# Altium schematic symbol library Connector.SchLib: 208 symbols (part 3 of 4)
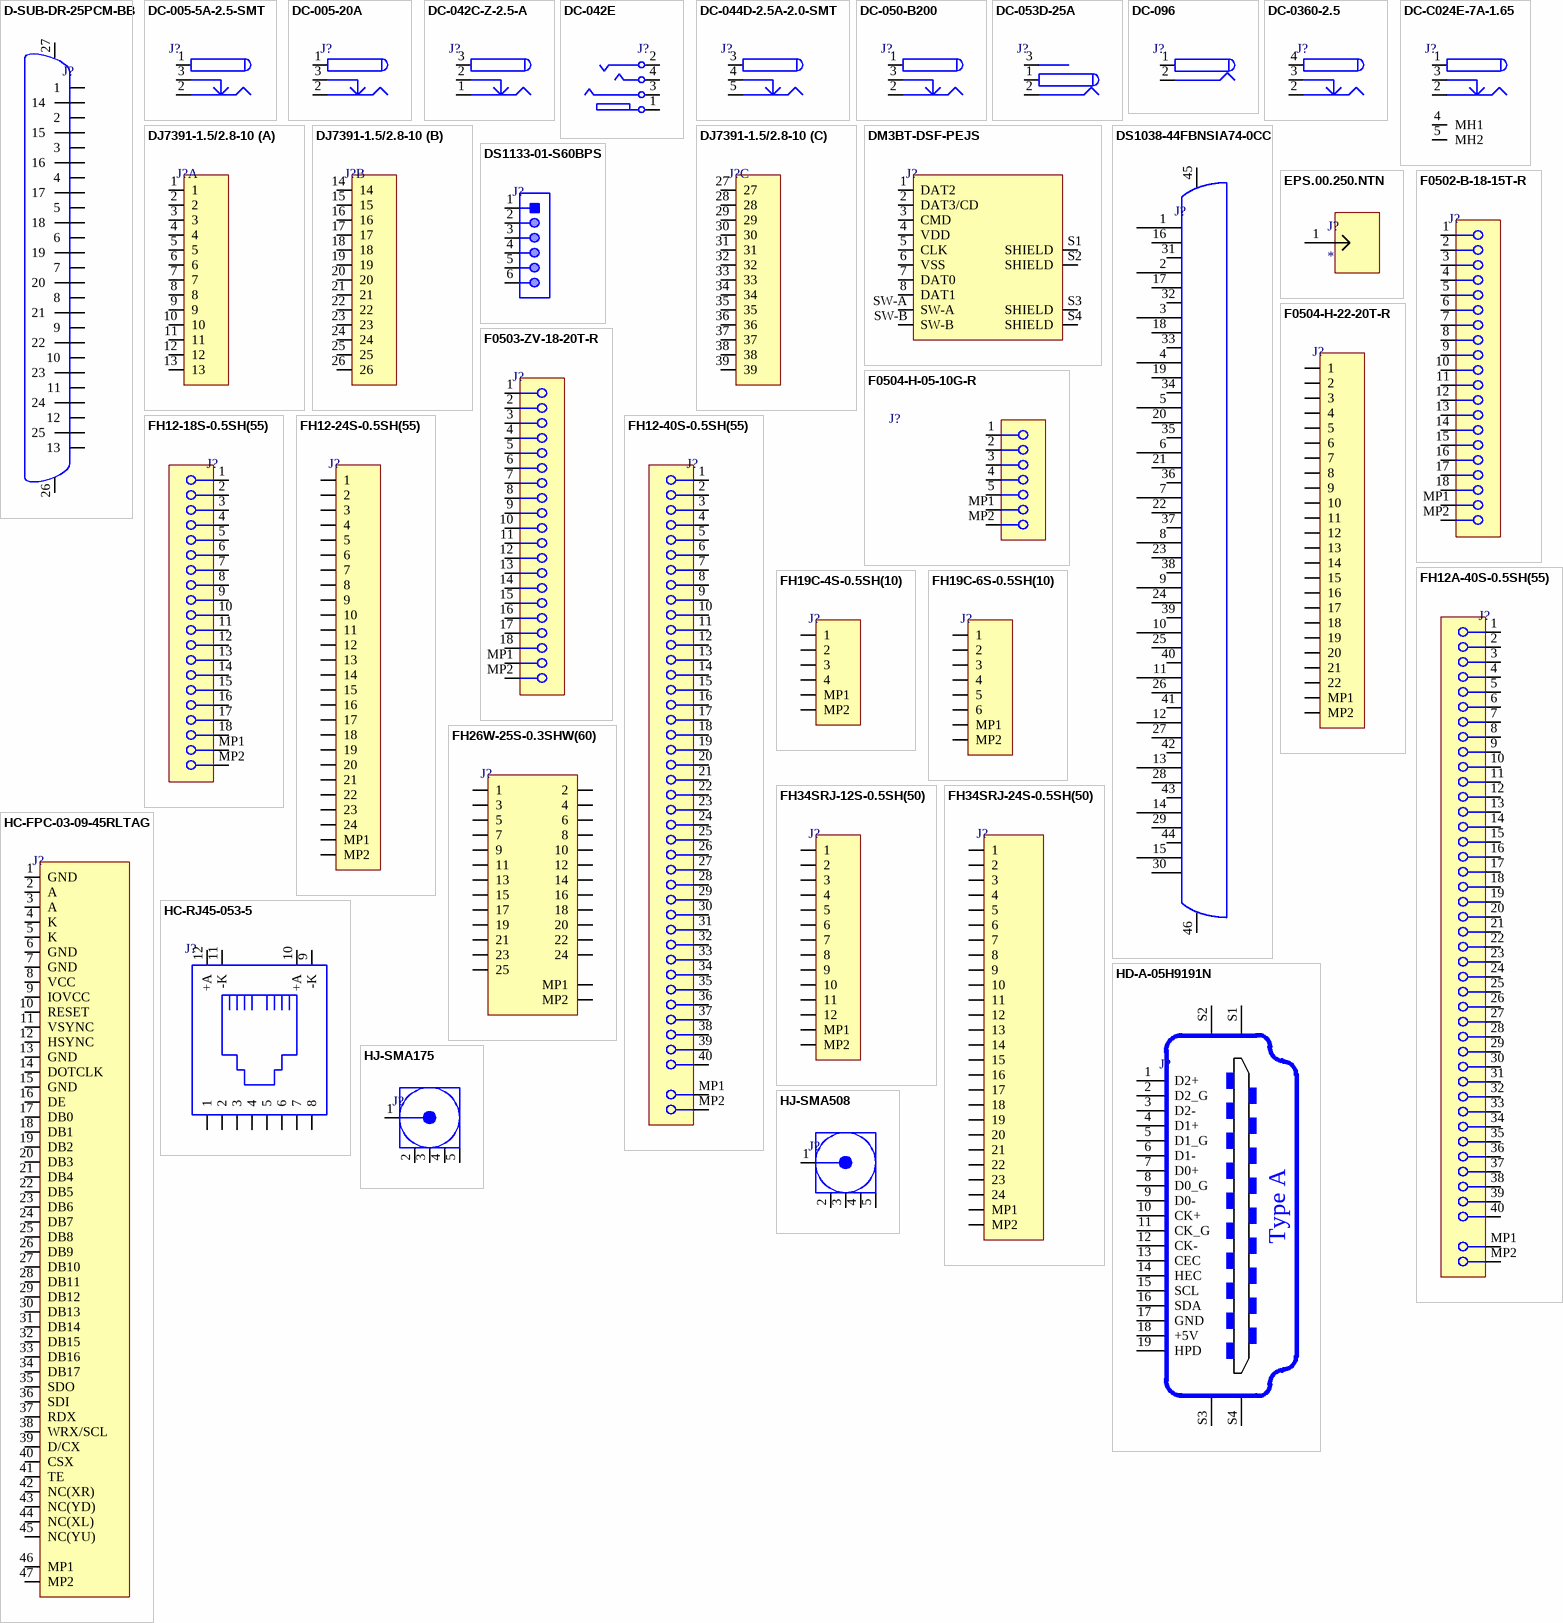
[diagram p10: symbols D-SUB-DR-25PCM-BB to HJ-SMA508]

## FH12A-40S-0.5SH(55)
designator J?
CONN FFC TOP 40POS 0.50MM R/A; Manufacturer: Hirose; Manufacturer Part Number: FH12A-40S-0.5SH(55); Connector Type: CARD EDGE CONNECTOR; Option: General Purpose; Contact Pattern: RECTANGULAR; Contact Style: BELLOWED TYPE; Filter Feature: No; Number Of PCB Rows: 1; Number of Contacts: 40; Board Mounting Option: SOLDER HOLDING POSTS; Contact Resistance: 50mR; Dielectric Withstanding Voltage (AC): 150V; Durability: 20Cycles; Insulation Resistance: 500MR; Rated Current (Signal): 500mA; Additional Feature: ROHS COMPLIANT; Body Breadth: 0.079inch; Body Length: 0.965inch; Mating Contact Pitch: 0.02inch; Mounting Option 1: LOCKING; Body Depth: 0.276inch; Reference Standard: UL; Reliability: COMMERCIAL; Item Type: FFC Connector; Supplier 1: Rs; RoHS: Yes; Category: FFC / FPC; Stock 1: 1020; Pricing 1: 200=1.21900, 750=1.09200, 3000=0.99700, 6000=0.89700 (GBP); Mounting Technology: Board; Contact Material: Bronze; Contact Finish - Mating: GOLD (8); Contact Finish - Termination: Gold (Au) - with Nickel (Ni) barrier; Insulation Color: Beige; Insulation Material: Polyamide; Min Operating Temperature: -40°C; Max Operating Temperature: 85°C; JESD-609 Code: e4; Contact Gender: Female; Mixed Contacts: No; Mounting Style: RIGHT ANGLE; Number of Rows Loaded: 1; PCB Contact Pattern: RECTANGULAR; Termination: SMD/SMT; Terminal Pitch: 0.5mm; Flammability Rating: UL94 V-0; RoHS Compliant: Yes; DIN Conformance: No; IEC Conformance: No; MIL Conformance: No; Reach SVHC Compliant: Yes; ComponentLink1URL: https://datasheet.ciiva.com:443/pdfs/VipMasterIC/IC/HIRO/HIRO-S-A0001800623/HIRO-S-A0003173477-1.pdf?src-supplier=IHS+Markit; ComponentLink1Description: https://datasheet.ciiva.com:443/pdfs/VipMasterIC/IC/HIRO/HIRO-S-A0001800623/HIRO-S-A0003173477-1.pdf?src-supplier=IHS+Markit; ComponentLink2URL: https://datasheet.ciiva.com/14667/0900766b80806912-14667338.pdf?src-supplier=Rs; ComponentLink2Description: https://datasheet.ciiva.com/14667/0900766b80806912-14667338.pdf?src-supplier=Rs; ComponentLink3URL: https://datasheet.ciiva.com/15176/getdatasheetpartid-432540-15176844.pdf?src-supplier=Verical; ComponentLink3Description: https://datasheet.ciiva.com/15176/getdatasheetpartid-432540-15176844.pdf?src-supplier=Verical; ComponentLink4URL: https://datasheet.ciiva.com/11745/0900766b80d985fc-11745193.pdf?src-supplier=Rs; ComponentLink4Description: https://datasheet.ciiva.com/11745/0900766b80d985fc-11745193.pdf?src-supplier=Rs; Supplier Part Number 1: 6882839P; LCSC Part Number: C506795
footprint FH12A-40S-0.5SH(55)
pins: 1, 2, 3, 4, 5, 6, 7, 8, 9, 10, 11, 12, 13, 14, 15, 16, 17, 18, 19, 20, 21, 22, 23, 24, 25, 26, 27, 28, 29, 30, 31, 32, 33, 34, 35, 36, 37, 38, 39, 40, MP1, MP2

## FH19C-4S-0.5SH(10)
designator J?
CONN FFC BOTTOM 4POS 0.5MM R/A; Manufacturer: Hirose; Manufacturer Part Number: FH19C-4S-0.5SH(10); Actuator Material: Polymer,Polyphenylene,Liquid Crystal Polymer; Voltage Rating: 50V; Current Rating: 500mA; Number of Positions: 4; Insulation Resistance: 500MR; Wire/Cable Type: Flat Flex; Pitch: 0.02inch; Item Type: FPC Connector; Supplier 1: Digi-Key; RoHS: Yes; Category: FFC / FPC; Stock 1: 7956; Pricing 1: 1=1.08, 10=0.916, 25=0.878, 50=0.8596, 100=0.8221, 250=0.7474, 500=0.67266, 1000=0.59792, 2500=0.54186 (USD); Mounting Technology: Surface Mount; Contact Material: Bronze; Contact Plating: Gold; Housing Material: Polymer; Min Operating Temperature: -55°C; Max Operating Temperature: 85°C; Packaging: Tape and Reel; Package Quantity: 5000; Termination: Solder; Series: FH19C; Flammability Rating: UL94 V-0; RoHS Compliant: Yes; ComponentLink1URL: https://datasheet.ciiva.com/18563/ed-fh19cfh19sc-20140305-18563548.pdf?src-supplier=Digi-Key; ComponentLink1Description: https://datasheet.ciiva.com/18563/ed-fh19cfh19sc-20140305-18563548.pdf?src-supplier=Digi-Key; Supplier Part Number 1: H125822CT-ND; LCSC Part Number: C424650
footprint FH19C-4S-0.5SH(10)
pins: 1, 2, 3, 4, MP1, MP2

## FH19C-6S-0.5SH(10)
designator J?
CONN FFC BOTTOM 6POS 0.50MM R/A; Manufacturer: Hirose; Manufacturer Part Number: FH19C-6S-0.5SH(10); Item Type: FFC Connector; Supplier 1: Digi-Key; RoHS: Yes; Category: FFC / FPC; Stock 1: 4697; Pricing 1: 1=1.10000, 10=0.96900, 25=0.91200, 50=0.87400, 100=0.83600, 250=0.76000, 500=0.68400, 1000=0.60800, 2500=0.55100 (USD); ComponentLink1URL: https://datasheet.ciiva.com/18563/ed-fh19cfh19sc-20140305-18563530.pdf?src-supplier=Digi-Key; ComponentLink1Description: https://datasheet.ciiva.com/18563/ed-fh19cfh19sc-20140305-18563530.pdf?src-supplier=Digi-Key; Supplier Part Number 1: H125824CT-ND; LCSC Part number: C424651
footprint FH19C-6S-0.5SH(10)_
pins: 1, 2, 3, 4, 5, 6, MP1, MP2

## FH26W-25S-0.3SHW(60)
designator J?
CONN FPC BOTTOM 25POS 0.3MM R/A; Manufacturer: Hirose; Manufacturer Part Number: FH26W-25S-0.3SHW(60); Item Type: FPC Connector; Supplier 1: Future Electronics; RoHS: Yes; Category: FFC / FPC; Stock 1: 5000; Pricing 1: 5000=0.85500 (USD); ComponentLink1URL: https://www.hirose.com/product/en/download_file/key_name/FH26/category/Catalog/doc_file_id/49355/?file_category_id=4&item_id=298&is_series=1&src-supplier=Digi-Key; ComponentLink1Description: https://www.hirose.com/product/en/download_file/key_name/FH26/category/Catalog/doc_file_id/49355/?file_category_id=4&item_id=298&is_series=1&src-supplier=Digi-Key; ComponentLink2URL: https://www.hirose.com/product/download/?distributor=digikey&amp;type=2d&amp;lang=en&amp;num=FH26W-13S-0.3SHW(60)&src-supplier=Digi-Key; ComponentLink2Description: https://www.hirose.com/product/download/?distributor=digikey&amp;type=2d&amp;lang=en&amp;num=FH26W-13S-0.3SHW(60)&src-supplier=Digi-Key; ComponentLink3URL: https://www.hirose.com/product/download/?distributor=digikey&amp;type=specSheet&amp;lang=en&amp;num=FH26W-25S-0.3SHW(60)&src-supplier=Digi-Key; ComponentLink3Description: https://www.hirose.com/product/download/?distributor=digikey&amp;type=specSheet&amp;lang=en&amp;num=FH26W-25S-0.3SHW(60)&src-supplier=Digi-Key; Supplier Part Number 1: 6089120; LCSC Part Number: C2904698
footprint FH26W-25S-0.3SHW(60)
pins: 1, 2, 3, 4, 5, 6, 7, 8, 9, 10, 11, 12, 13, 14, 15, 16, 17, 18, 19, 20, 21, 22, 23, 24, 25, MP1, MP2

## FH34SRJ-12S-0.5SH(50)
designator J?
CONN FPC/FFC 12POS .5MM; Manufacturer: Hirose; Manufacturer Part Number: FH34SRJ-12S-0.5SH(50); Item Type: FFC Connector; Supplier 1: Digi-Key; RoHS: Yes; Category: FFC / FPC; Pricing 1: 5000=0.47775 (USD); ComponentLink1URL: https://www.hirose.com/product/en/download_file/key_name/FH34SRJ/category/Catalog/doc_file_id/31646/?file_category_id=4&item_id=27&is_series=1&src-supplier=Digi-Key; ComponentLink1Description: https://www.hirose.com/product/en/download_file/key_name/FH34SRJ/category/Catalog/doc_file_id/31646/?file_category_id=4&item_id=27&is_series=1&src-supplier=Digi-Key; Supplier Part Number 1: FH34SRJ-12S-0.5SH(50)-ND; LCSC Part Number: C424659
footprint FH34SRJ-12S-0.5SH(50)_
pins: 1, 2, 3, 4, 5, 6, 7, 8, 9, 10, 11, 12, MP1, MP2

## FH34SRJ-24S-0.5SH(50)
designator J?
CONN FPC/FFC 24POS .5MM; Manufacturer: Hirose; Manufacturer Part Number: FH34SRJ-24S-0.5SH(50); Supplier 1: Digi-Key; RoHS: Yes; Category: FFC / FPC; Stock 1: 5000; Pricing 1: 5000=0.53562 (USD); ComponentLink1URL: https://www.hirose.com/product/download/?distributor=digikey&amp;type=specSheet&amp;lang=en&amp;num=FH34SRJ-24S-0.5SH(50)&src-supplier=Digi-Key; ComponentLink1Description: https://www.hirose.com/product/download/?distributor=digikey&amp;type=specSheet&amp;lang=en&amp;num=FH34SRJ-24S-0.5SH(50)&src-supplier=Digi-Key; Supplier Part Number 1: FH34SRJ-24S-0.5SH(50)-ND; LCSC Part Number: C324726
footprint FH34SRJ-24S-0.5SH(50)
pins: 1, 2, 3, 4, 5, 6, 7, 8, 9, 10, 11, 12, 13, 14, 15, 16, 17, 18, 19, 20, 21, 22, 23, 24, MP1, MP2

## HC-FPC-03-09-45RLTAG
designator J?
-55℃~+85℃ Clamshell 45P Bottom Contact Surface Mount，Right Angle 0.3mm SMD,P=0.3mm,Surface Mount，Right Angle FFC/FPC Connectors ROHS; Manufacturer: HCTL; Manufacturer Part Number: HC-FPC-03-09-45RLTAG; Package: SMD,P=0.3mm,Surface Mount，Right Angle; LCSC Part Number: C5213725; Item Type: FFC/FPC Connector; ComponentLink1Description: LCSC; ComponentLink1URL: https://www.lcsc.com/product-detail/FFC-FPC-Connectors_HCTL-HC-FPC-03-09-45RLTAG_C5213725.html
footprint HC-FPC-03-09-45RLTAG
pins: 1 GND, 2 A, 3 A, 4 K, 5 K, 6 GND, 7 GND, 8 VCC, 9 IOVCC, 10 RESET, 11 VSYNC, 12 HSYNC, 13 GND, 14 DOTCLK, 15 GND, 16 DE, 17 DB0, 18 DB1, 19 DB2, 20 DB3, 21 DB4, 22 DB5, 23 DB6, 24 DB7, 25 DB8, 26 DB9, 27 DB10, 28 DB11, 29 DB12, 30 DB13, 31 DB14, 32 DB15, 33 DB16, 34 DB17, 35 SDO, 36 SDI, 37 RDX, 38 WRX/SCL, 39 D/CX, 40 CSX, 41 TE, 42 NC(XR), 43 NC(YD), 44 NC(XL), 45 NC(YU), 46 MP1, 47 MP2

## HC-RJ45-053-5
designator J?
Plugin Ethernet Connectors/Modular Connectors (RJ45 RJ11) ROHS; Manufacturer Part Number: HC-RJ45-053-5; Manufacturer: HCTL; LCSC Part Number: C3010566; Item Type: Connectors (RJ45 RJ11); ComponentLink1Description: LCSC; ComponentLink1URL: https://www.lcsc.com/product-detail/Ethernet-Connectors-Modular-Connectors-span-style-background-color-ff0-RJ45-span-RJ11_HCTL-HC-RJ45-053-5_C3010566.html
footprint HC-RJ45-053-5
pins: 1, 2, 3, 4, 5, 6, 7, 8, 9 -K, 10 +A, 11 -K, 12 +A

## HD-A-05H9191N
designator J?
19P Female HDMI Surface Mount，Right Angle 1 500mA -45℃~+85℃ SMD D-Sub/DVI/HDMI Connectors ROHS; Manufacturer: HanElectricity; Manufacturer Part Number: HD-A-05H9191N; Package: SMD; LCSC Part Number: C18213861; Item Type: HDMI; ComponentLink1Description: LCSC; ComponentLink1URL: https://www.lcsc.com/product-detail/D-Sub-DVI-HDMI-Connectors_HanElectricity-HD-A-05H9191N_C18213861.html
footprint HD-A-05H9191N
pins: 1 D2+, 2 D2_G, 3 D2-, 4 D1+, 5 D1_G, 6 D1-, 7 D0+, 8 D0_G, 9 D0-, 10 CK+, 11 CK_G, 12 CK-, 13 CEC, 14 HEC, 15 SCL, 16 SDA, 17 GND, 18 +5V, 19 HPD, S1 Shield "Shell", S2 Shield "Shell", S3 Shield "Shell", S4 Shield "Shell"
text: Type A

## HJ-SMA175
designator J?
1 Inner bore SMA Board Edge Bend 11mm 5.35mm Plugin RF Connectors / Coaxial Connectors ROHS; Manufacturer: HJ Tech; Manufacturer Part Number: HJ-SMA175; Item Type: SMA Connector; Package: Plugin; LCSC Part Number: C1509213; ComponentLink1Description: LCSC; ComponentLink1URL: https://www.lcsc.com/product-detail/RF-Connectors-Coaxial-Connectors_HJ-Tech-HJ-SMA175_C1509213.html
footprint HJ-SMA175
pins: 1 Signal "Signal Pin", 2 GND, 3 GND, 4 GND, 5 GND

## HJ-SMA508
designator J?
1 Inner bore SMA Board Edge Bend -55℃~+155℃ 50Ω Plugin RF Connectors / Coaxial Connectors ROHS; Manufacturer: HJ Tech; Manufacturer Part Number: HJ-SMA508; Footprint: Custom; ComponentLink1Description: LCSC; ComponentLink1URL: https://lcsc.com/product-detail/RF-Connectors-Coaxial-Connectors_HJ-Tech-HJ-SMA508_C1509209.html; LCSC Part Number: C1509209; Item Type: SMA
footprint HJ-SMA508_
pins: 1 Signal "Signal Pin", 2 GND, 3 GND, 4 GND, 5 GND

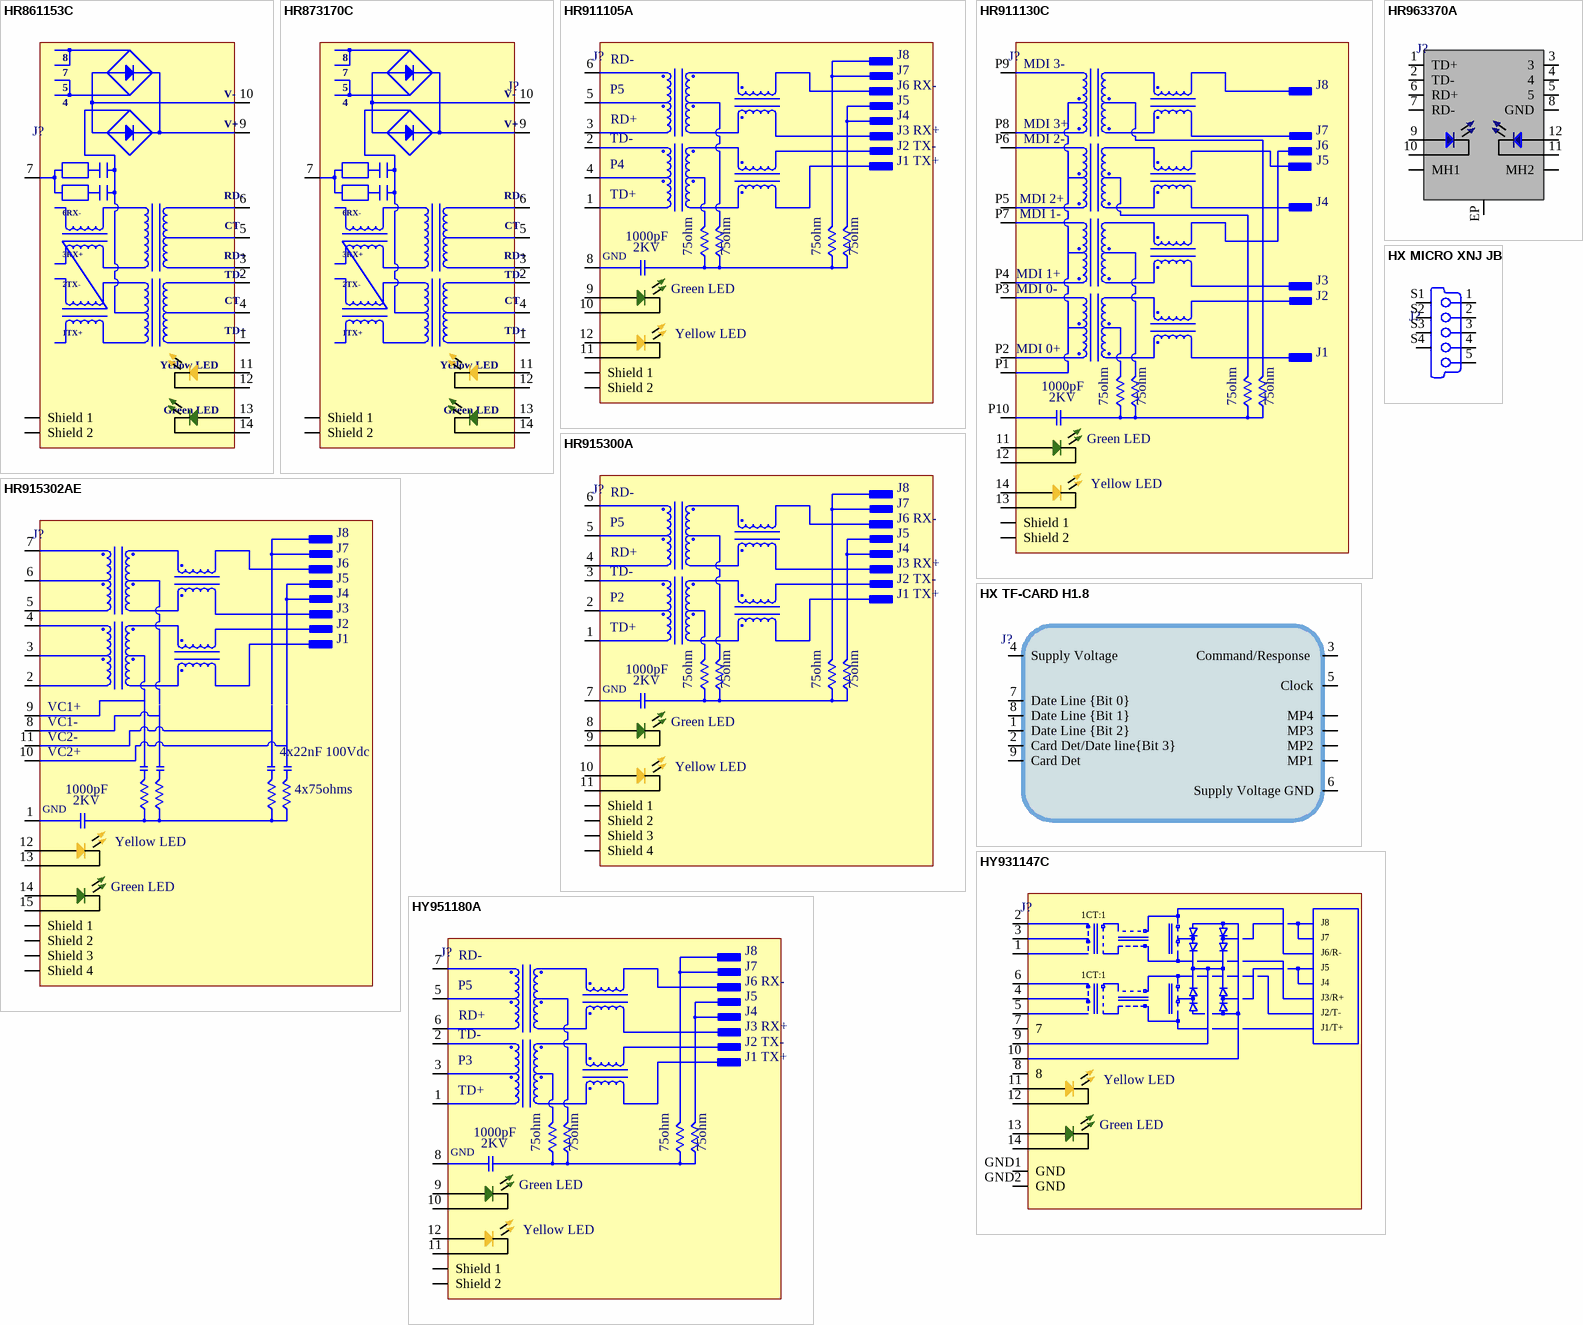
[diagram p5: symbols HR861153C to HY951180A]

## HR861153C
designator J?
Single Port RJ45 Connector with Integrated Magnetics and LED for 10/100Base-TX PoE application; Manufacturer: Hanrun; Manufacturer Part Number: HR861153C; Item Type: Ethernet Connector; Package: Custom; LCSC Part Number: *
footprint HR861153C
pins: 1 TD+, 2 TD-, 3 RD+, 4 CT, 5 CT, 6 RD-, 7 GND, 9 V+, 10 V-, 11 ANODE , 12 CATHODE, 13 ANODE , 14 CATHODE, Shield 1, Shield 2
text: 8; 6RX-; 3RX+; 2TX-; 1TX+; Yellow LED; Green LED

## HR873170C
designator J?
1x1 Port Tab-UP RJ45 Connector with Integrated Magnetics and LED for 10/100Base-T PoE application; Manufacturer: Hanrun; Manufacturer Part Number: HR873170C; Item Type: Ethernet Connector; Package: Custom; LCSC Part Number: *
footprint HR873170C
pins: 1 TD+, 2 TD-, 3 RD+, 4 CT, 5 CT, 6 RD-, 7 GND, 9 V+, 10 V-, 11 ANODE , 12 CATHODE, 13 ANODE , 14 CATHODE, Shield 1, Shield 2
text: 8; 6RX-; 3RX+; 2TX-; 1TX+; Yellow LED; Green LED

## HR911105A
designator J?
RJ45 RJReceptacle 1 WithLED Plugin Ethernet Connectors/Modular Connectors (RJ45 RJ11) ROHS; Manufacturer: HANRUN; Manufacturer Part Number: HR911105A; Item Type: RJ45 Connector; Package: Plugin; LCSC Part Number: C12074; ComponentLink1Description: LCSC; ComponentLink1URL: https://www.lcsc.com/product-detail/Ethernet-Connectors-Modular-Connectors-RJ45-RJ11_HANRUN-Zhongshan-HanRun-Elec-HR911105A_C12074.html
footprint HR911105A
pins: 1 TD+, 2 TD-, 3 RD+, 4 P4, 5 P5, 6 RD-, 8 GND (power), 9 ANODE , 10 CATHODE, 11 CATHODE, 12 ANODE , Shield 1, Shield 2
text: J8; J7; J6 RX-; J5; J4; J3 RX+; J2 TX-; J1 TX+; 1000pF; 2KV; 75ohm; Green LED; Yellow LED

## HR911130C
designator J?
RJ45 RJReceptacle 1 Internal oscillator included Shrouded WithLED Plugin Ethernet Connectors/Modular Connectors (RJ45 RJ11) ROHS; Manufacturer: HANRUN; Manufacturer Part Number: HR911130C; LCSC Part Number: C50933; Item Type: Ethernet Connector; ComponentLink1Description: LCSC; ComponentLink1URL: https://www.lcsc.com/product-detail/Ethernet-Connectors-Modular-Connectors-RJ45-RJ11_HANRUN-Zhongshan-HanRun-Elec-HR911130C_C50933.html
footprint HR911130C
pins: 11, 12, 13, 14, P1, P2, P3 P4, P4, P5, P6, P7, P8, P9, P10 (power), SH1 Shield 1, SH2 Shield 2
text: MDI 3-; J8; MDI 3+; J7; MDI 2-; J6; J5; MDI 2+; J4; MDI 1-; MDI 1+; J3; MDI 0-; J2; MDI 0+; J1; 1000pF; 2KV; 75ohm; Green LED; Yellow LED

## HR915300A
designator J?
Plugin Ethernet Connectors/Modular Connectors (RJ45 RJ11) ROHS; Manufacturer: HANRUN; Manufacturer Part Number: HR915300A; Item Type: Connectors (RJ45 RJ11); Package: Cuatom
footprint HR915300A
pins: 1 TD+, 2 P4, 3 TD-, 4 RD+, 5 P5, 6 RD-, 7 GND (power), 8 ANODE , 9 CATHODE, 10 ANODE , 11 CATHODE, SH1 Shield 1, SH2 Shield 2, SH3 Shield 3, SH4 Shield 4
text: J8; J7; J6 RX-; J5; J4; J3 RX+; J2 TX-; P2; J1 TX+; 1000pF; 2KV; 75ohm; Green LED; Yellow LED

## HR915302AE
designator J?
Low Profile 1x1 Port Tab-UP RJ45 Connector with Magnetics Module and LED For 10/100 Base T PoE Application; Manufacturer: Hanrun; Manufacturer Part Number: HR915302AE; Item Type: Connector RJ45; Package: Custom
footprint HR915302AE
pins: 1 P1 (power), 2 P2, 3 P3, 4 P4, 5 P5, 6 P6, 7 P7, 8 VC1-, 9 VC1+, 10 VC2+, 11 VC2-, 12 ANODE , 13 CATHODE, 14 ANODE , 15 CATHODE, SH1 Shield 1, SH2 Shield 2, SH3 Shield 3, SH4 Shield 4
text: J8; J7; J6; J5; J4; J3; J2; J1; 4x22nF 100Vdc; 1000pF; 4x75ohms; 2KV; GND; Yellow LED; Green LED

## HR963370A
designator J?
1x1 Port Tab upright Surface Mount RJ45 Connector with Integrated Magnetics and LED; Manufacturer: Hanrun; Manufacturer Part Number: HR963370A; Item Type: Ethernet Connector; Package: Custom
footprint HR963370A
pins: 1 TD+, 2 TD-, 3, 4, 5, 6 RD+, 7 RD-, 8 GND, 9 ANODE , 10 CATHODE, 11 CATHODE, 12 ANODE , EP, MH1, MH2

## HX MICRO XNJ JB
designator J?
Female Micro-B SMD USB Connectors ROHS; Manufacturer: HANXIA; Manufacturer Part Number: HX MICRO XNJ JB; Item Type: Micro-B Connector; Package: Custom; LCSC Part Number: C5160305; ComponentLink1Description: LCSC; ComponentLink1URL: https://www.lcsc.com/product-detail/USB-Connectors_hanxia-HX-MICRO-XNJ-JB_C5160305.html
footprint HX MICRO XNJ JB
pins: 1 V BUS (5V) "USB Vcc [Red]", 2 D- "USB Data - [White]", 3 D+ "USB Data + [Green]", 4 ID "Not Connected (or joined to pin 5 via resistor)", 5 GND "Ground [Black]", S1 Shield "Shell", S2 Shield "Shell", S3 Shield "Shell", S4 Shield "Shell"

## HX TF-CARD H1.8
designator J?
-40℃~+70℃ 1.8mm Gold Card Slot MicroSD card (TF card) Brass Alloy Self-bouncing SMD SD Card / Memory Card Connector ROHS; Manufacturer: hanxia; Manufacturer Part Number: HX TF-CARD H1.8; Card Connection Mode: Pluggable; Item Type: MicroSD; ComponentLink1Description: LCSC; ComponentLink1URL: https://www.lcsc.com/product-detail/SD-Card-Memory-Card-Connector_hanxia-HX-TF-CARD-H1-8_C19189036.html; LCSC Part Number: C19189036
footprint HX TF-CARD H1.8
pins: 1 Date Line {Bit 2}, 2 Card Det/Date line{Bit 3}, 3 Command/Response , 4 Supply Voltage (power), 5 Clock, 6 Supply Voltage GND (power), 7 Date Line {Bit 0}, 8 Date Line {Bit 1}, 9 Card Det, MP1, MP2, MP3, MP4

## HY931147C
designator J?
RJ45Receptacle 1 WithLED Plugin Ethernet Connectors / Modular Connectors (RJ45 RJ11) ROHS; Manufacturer: HANRUN; Manufacturer Part Number: HY931147C; Item Type: RJ45 Connector; Package: Plugin; LCSC Part Number: C91754; ComponentLink1Description: LCSC; ComponentLink1URL: https://www.lcsc.com/product-detail/Ethernet-Connectors-Modular-Connectors-RJ45-RJ11_HANRUN-Zhongshan-HanRun-Elec-HY931147C_C91754.html
footprint HY931147C
pins: 1, 2, 3, 4, 5, 6, 7, 8, 9, 10, 11, 12, 13, 14, GND1 GND, GND2 GND
text: 1CT:1; J8; J7; J6/R-; J5; J4; J3/R+; J2/T-; J1/T+; Yellow LED; Green LED

## HY951180A
designator J?
Through Hole Ethernet Connectors/Modular Connectors (RJ45 RJ11) ROHS; Manufacturer: HANRUN; Manufacturer Part Number: HY951180A; Item Type: RJ45 Connector; Package: Custom; LCSC Part Number: C34677; ComponentLink1Description: LCSC; ComponentLink1URL: https://lcsc.com/product-detail/Ethernet-Connectors-Modular-Connectors-RJ45-RJ11_HANRUN-Zhongshan-HanRun-Elec-HY951180A_C34677.html
footprint HY951180A.
pins: 1 TD+, 2 TD-, 3 P3, 5 P5, 6 RD+, 7 RD-, 8 GND (power), 9 ANODE , 10 CATHODE, 11 CATHODE, 12 ANODE , Shield 1, Shield 2
text: J8; J7; J6 RX-; J5; J4; J3 RX+; J2 TX-; J1 TX+; 1000pF; 2KV; 75ohm; Green LED; Yellow LED

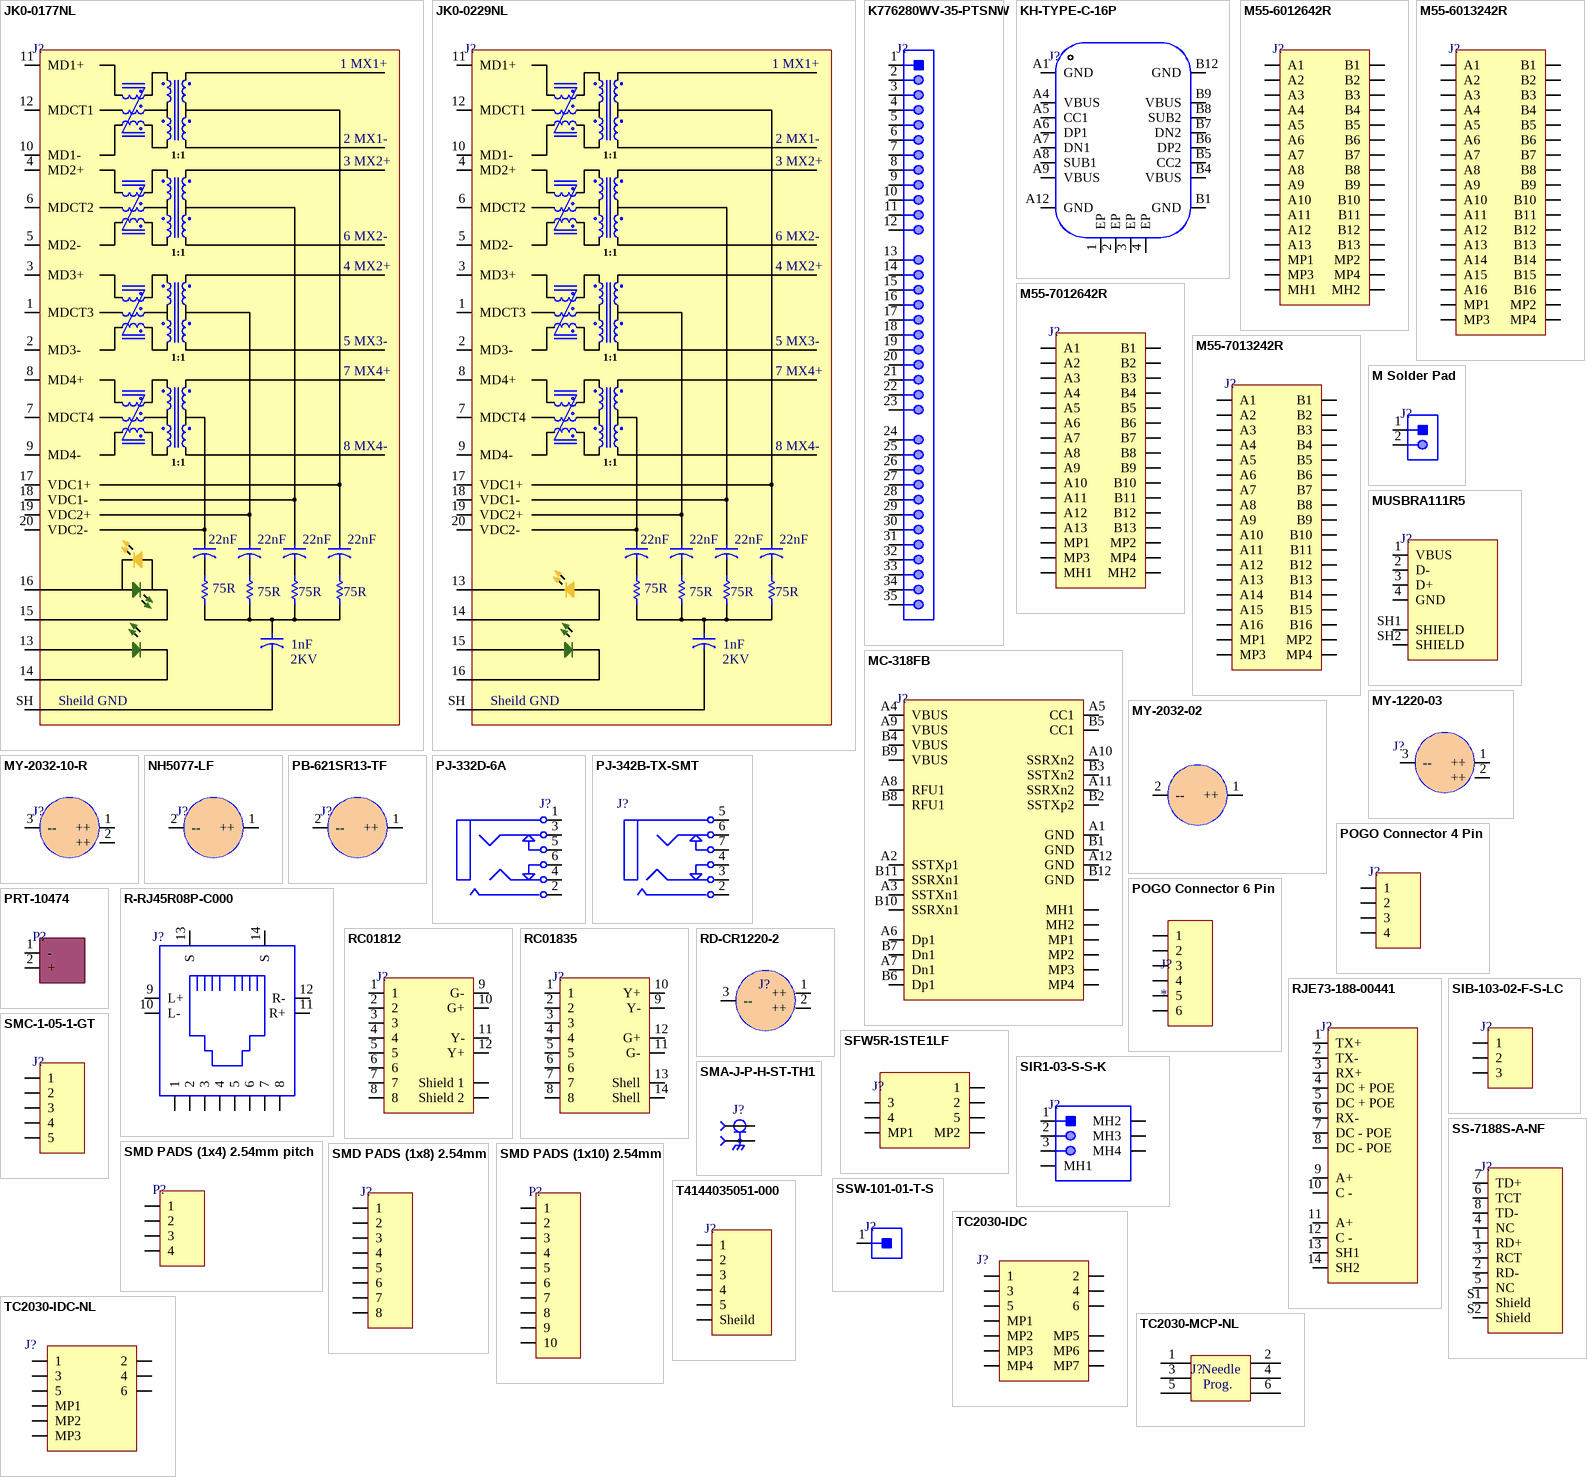
[diagram p6: symbols JK0-0177NL to TC2030-MCP-NL]

## JK0-0177NL
designator J?
CONN JACK 1PORT 1000 BASE-T PCB; Manufacturer: Pulse; Manufacturer Part Number: JK0-0177NL; Item Type: Modular / Ethernet Connectors; Supplier: Digikey; Supplier Part Number: 553-2618-ND; RoHS: Yes; Stock: 436; Pricing: 1=12.44, 10=11.029, 25=10.6048, 45=10.18044, 90=9.61489, 270=8.76648, 450=8.20091, 945=7.52221 (USD); ComponentLink1URL: https://datasheet.ciiva.com/15369/217773-15369015.pdf?src-supplier=Mouser; ComponentLink1Description: https://datasheet.ciiva.com/15369/217773-15369015.pdf?src-supplier=Mouser; ComponentLink2URL: https://datasheet.ciiva.com/688/j432-688128.pdf?src-supplier=Digikey; ComponentLink2Description: https://datasheet.ciiva.com/688/j432-688128.pdf?src-supplier=Digikey
footprint JK0-0177NL
pins: 1 MDCT3, 2 MD3-, 3 MD3+, 4 MD2+, 5 MD2-, 6 MDCT2, 7 MDCT4, 8 MD4+, 9 MD4-, 10 MD1-, 11 MD1+, 12 MDCT1, 13 ANODE, 14 CATHODE, 15 ANODE/CATHODE, 16 ANODE/CATHODE, 17 VDC1+, 18 VDC1-, 19 VDC2+, 20 VDC2-, SH Shield GND
text: 1 MX1+; 2 MX1-; 1:1; 3 MX2+; 6 MX2-; 4 MX2+; 5 MX3-; 7 MX4+; 8 MX4-; 22nF; 75R; 1nF; 2KV; Sheild GND

## JK0-0229NL
designator J?
Modular Connectors / Ethernet Connectors 1000Base-T RJ45 1X1 1GPoE 140W; Manufacturer: Pulse; Manufacturer Part Number: JK0-0229NL; Item Type: Modular / Ethernet Connectors; Supplier: Arrow Electronics; Supplier Part Number: JK0-0229NL; RoHS: Yes; Stock: 10080; Pricing: 225=7.169, 270=6.882, 450=6.835, 540=6.738, 945=6.675 (USD); ComponentLink1URL: http://datasheet.octopart.com/JK0-0229NL-Pulse-datasheet-137249669.pdf?src-supplier=Mouser; ComponentLink1Description: http://datasheet.octopart.com/JK0-0229NL-Pulse-datasheet-137249669.pdf?src-supplier=Mouser; ComponentLink2URL: http://datasheet.octopart.com/JK0-0229NL-Pulse-datasheet-137249669.pdf?src-supplier=Avnet; ComponentLink2Description: http://datasheet.octopart.com/JK0-0229NL-Pulse-datasheet-137249669.pdf?src-supplier=Avnet; ComponentLink3URL: http://datasheet.octopart.com/JK0-0229NL-Pulse-datasheet-137249669.pdf?src-supplier=Digikey; ComponentLink3Description: http://datasheet.octopart.com/JK0-0229NL-Pulse-datasheet-137249669.pdf?src-supplier=Digikey; ComponentLink4URL: http://datasheet.octopart.com/JK0-0229NL-Pulse-datasheet-137249669.pdf?src-supplier=Future+Electronics; ComponentLink4Description: http://datasheet.octopart.com/JK0-0229NL-Pulse-datasheet-137249669.pdf?src-supplier=Future+Electronics; ComponentLink5URL: http://datasheet.octopart.com/JK0-0229NL-Pulse-datasheet-137249669.pdf?src-supplier=Onlinecomponents.com; ComponentLink5Description: http://datasheet.octopart.com/JK0-0229NL-Pulse-datasheet-137249669.pdf?src-supplier=Onlinecomponents.com; ComponentLink6URL: https://datasheet.octopart.com/JK0-0229NL-Pulse-datasheet-137249669.pdf?src-supplier=Electro+Sonic; ComponentLink6Description: https://datasheet.octopart.com/JK0-0229NL-Pulse-datasheet-137249669.pdf?src-supplier=Electro+Sonic; ComponentLink7URL: http://datasheet.octopart.com/JK0-0229NL-Pulse-datasheet-137249669.pdf?src-supplier=Sager+Electronics; ComponentLink7Description: http://datasheet.octopart.com/JK0-0229NL-Pulse-datasheet-137249669.pdf?src-supplier=Sager+Electronics; ComponentLink8URL: http://datasheet.octopart.com/JK0-0229NL-Pulse-datasheet-137249669.pdf?src-supplier=TTI; ComponentLink8Description: http://datasheet.octopart.com/JK0-0229NL-Pulse-datasheet-137249669.pdf?src-supplier=TTI
footprint JK0-0229NL
pins: 1 MDCT3, 2 MD3-, 3 MD3+, 4 MD2+, 5 MD2-, 6 MDCT2, 7 MDCT4, 8 MD4+, 9 MD4-, 10 MD1-, 11 MD1+, 12 MDCT1, 13 Cathode, 14 Anode, 15 ANODE, 16 Cathode, 17 VDC1+, 18 VDC1-, 19 VDC2+, 20 VDC2-, SH Shield GND
text: 1 MX1+; 2 MX1-; 1:1; 3 MX2+; 6 MX2-; 4 MX2+; 5 MX3-; 7 MX4+; 8 MX4-; 22nF; 75R; 1nF; 2KV; Sheild GND

## K776280WV-35-PTSNW
designator J?
3 Straight 35P 4mm Tin - Automobile Connectors ROHS; Manufacturer: XKB Connection; Manufacturer Part Number: K776280WV-35-PTSNW; Package: Custom; LCSC Part Number: C5138064; Item Type: Automobile Connector; ComponentLink1Description: LCSC; ComponentLink1URL: https://www.lcsc.com/product-detail/Automobile-Connectors_XKB-Connection-K776280WV-35-PTSNW_C5138064.html
footprint K776280WV-35-PTSNW
pins: 1, 2, 3, 4, 5, 6, 7, 8, 9, 10, 11, 12, 13, 14, 15, 16, 17, 18, 19, 20, 21, 22, 23, 24, 25, 26, 27, 28, 29, 30, 31, 32, 33, 34, 35

## KH-TYPE-C-16P
designator J?
3A 1 Surface Mount，Right Angle 16P Female -40℃~+85℃ Type-C SMD USB Connectors ROHS; Manufacturer: Shenzhen Kinghelm Elec; Manufacturer Part Number: KH-TYPE-C-16P; Package: SMD; LCSC Part Number: C709357; Item Type: Type-C SMD USB; ComponentLink1Description: LCSC; ComponentLink1URL: https://www.lcsc.com/product-detail/USB-Connectors_Shenzhen-Kinghelm-Elec-KH-TYPE-C-16P_C709357.html
footprint KH-TYPE-C-16P
pins: 1 EP, 2 EP, 3 EP, 4 EP, A1 GND, A4 VBUS, A5 CC1, A6 DP1, A7 DN1, A8 SUB1, A9 VBUS, A12 GND, B1 GND, B4 VBUS, B5 CC2, B6 DP2, B7 DN2, B8 SUB2, B9 VBUS, B12 GND

## M55-6012642R
designator J?
CONN RCPT 26POS 0.05 GOLD SMD; Manufacturer: Harwin; Manufacturer Part Number: M55-6012642R; Supplier 1: Digi-Key; RoHS: Yes; Category: Connectors; Stock 1: 320; Pricing 1: 1=2.50000, 10=2.17600, 100=1.94480 (USD); RoHS Compliant: Yes; Supplier Part Number 1: 952-3846-1-ND
footprint M55-6012642R
pins: A1, A2, A3, A4, A5, A6, A7, A8, A9, A10, A11, A12, A13, B1, B2, B3, B4, B5, B6, B7, B8, B9, B10, B11, B12, B13, MH1, MH2, MP1, MP2, MP3, MP4

## M55-6013242R
designator J?
CONN RCPT 1.27MM SMD 32POS; Manufacturer: Harwin; Manufacturer Part Number: M55-6013242R; Item Type: Receptacle Connector; Supplier: Mouser; Supplier Part Number: 855-M55-6013242R; RoHS: Yes; Category: Connectors; Stock: 3210; Pricing: 1=3.74, 10=3.21, 50=3.21, 100=2.99, 1000=2.11, 10000=2.01 (USD)
footprint M55-6013242R
pins: A1, A2, A3, A4, A5, A6, A7, A8, A9, A10, A11, A12, A13, A14, A15, A16, B1, B2, B3, B4, B5, B6, B7, B8, B9, B10, B11, B12, B13, B14, B15, B16, MP1, MP2, MP3, MP4

## M55-7012642R
designator J?
CONN HEADER SMD 26POS 1.27MM; Manufacturer: Harwin; Manufacturer Part Number: M55-7012642R; Supplier 1: Digi-Key; RoHS: Yes; Category: Connectors; Stock 1: 384; Pricing 1: 1=1.43000, 10=1.24900, 100=1.11570 (USD); RoHS Compliant: Yes; Supplier Part Number 1: 952-3878-1-ND
footprint M55-7012642R
pins: A1, A2, A3, A4, A5, A6, A7, A8, A9, A10, A11, A12, A13, B1, B2, B3, B4, B5, B6, B7, B8, B9, B10, B11, B12, B13, MH1, MH2, MP1, MP2, MP3, MP4

## M55-7013242R
designator J?
CONN HDR 1.27MM SMD 32POS; Manufacturer: Harwin; Manufacturer Part Number: M55-7013242R; Item Type: Connector Header; Supplier: Mouser; Supplier Part Number: 855-M55-7013242R; RoHS: Yes; Category: Connectors; Stock: 1347; Pricing: 1=2.13, 10=1.82, 50=1.82, 100=1.63, 1000=1.17, 10000=1.07 (USD)
footprint M55-7013242R
pins: A1, A2, A3, A4, A5, A6, A7, A8, A9, A10, A11, A12, A13, A14, A15, A16, B1, B2, B3, B4, B5, B6, B7, B8, B9, B10, B11, B12, B13, B14, B15, B16, MP1, MP2, MP3, MP4

## M Solder Pad
designator J?
2mm pitch Solder Pad
footprint M Solder Pad
pins: 1, 2

## MC-318FB
designator J?
USB 3.0 3A 1 Brick nogging 24 Female -35℃~+75℃ Type-C SMD USB Connectors ROHS; Manufacturer: SOFNG; Manufacturer Part Number: MC-318FB; ComponentLink1Description: LCSC; ComponentLink1URL: https://www.lcsc.com/product-detail/USB-Connectors_SOFNG-MC-318FB_C2977724.html; Footprint: Custom; LCSC Part Number: C2977724
footprint MC-318FB
pins: A1 GND, A2 SSTXp1, A3 SSTXn1, A4 VBUS, A5 CC1, A6 Dp1, A7 Dn1, A8 RFU1, A9 VBUS, A10 SSRXn2, A11 SSRXn2, A12 GND, B1 GND, B2 SSTXp2, B3 SSTXn2, B4 VBUS, B5 CC1, B6 Dp1, B7 Dn1, B8 RFU1, B9 VBUS, B10 SSRXn1, B11 SSRXn1, B12 GND, MH1, MH2, MP1, MP2, MP3, MP4

## MUSBRA111R5
designator J?
CONN RCPT USB2.0 TYPEA 4P PCB RA; Manufacturer: AMPHENOL ICC (COMMERCIAL PRODUCTS); Manufacturer Part Number: MUSBRA111R5; Supplier: Digikey; Supplier Part Number: MUSBRA111R5-ND; RoHS: No
footprint MUSBRA111R5
pins: 1 VBUS, 2 D-, 3 D+, 4 GND, SH1 SHIELD, SH2 SHIELD

## MY-1220-03
designator J?
Battery button CR1220 SMD Battery Connectors ROHS; Manufacturer: MYOUNG; Manufacturer Part Number: MY-1220-03; Item Type: Coin Cell Holder; Package: SMD; LCSC Part Number: C964818; ComponentLink1Description: LCSC; ComponentLink1URL: https://www.lcsc.com/product-detail/Battery-Connectors_MYOUNG-MY-1220-03_C964818.html
footprint MY-1220-03
pins: 1 ++, 2 ++, 3 --

## MY-2032-02
designator J?
Battery button CR2032 Plugin Battery Connectors ROHS; Manufacturer: MYOUNG; Manufacturer Part Number: MY-2032-02; Package: Plugin; LCSC Part Number: C964822; Item Type: Battery Connector; ComponentLink1Description: LCSC; ComponentLink1URL: https://www.lcsc.com/product-detail/Battery-Connectors_MYOUNG-MY-2032-02_C964822.html
footprint MY-2032-02
pins: 1 ++, 2 --

## MY-2032-10-R
designator J?
Battery button CR2032 SMD Battery Connectors ROHS; Manufacturer: MYOUNG; Manufacturer Part Number: MY-2032-10-R; Package: SMD; LCSC Part Number: C964828; Item Type: Battery Connector; ComponentLink1Description: LCSC; ComponentLink1URL: https://www.lcsc.com/product-detail/Battery-Connectors_MYOUNG-MY-2032-10-R_C964828.html
footprint MY-2032-10-R
pins: 1 ++, 2 ++, 3 --

## NH5077-LF
designator J?
Coin Cell Battery Holders VERT HOLDER FOR OR CR2477N; Manufacturer: Renata; Manufacturer Part Number: NH5077-LF; Item Type: Batteries and Accessories; Supplier: Future Electronics; Supplier Part Number: 3698206; RoHS: Yes; Stock: 477; Pricing: 50=1.72, 200=1.68, 750=1.63, 1500=1.61, 3750=1.56 (USD); ComponentLink1URL: https://datasheet.ciiva.com/16990/nh5077-lf-16990158.pdf?src-supplier=Future+Electronics; ComponentLink1Description: https://datasheet.ciiva.com/16990/nh5077-lf-16990158.pdf?src-supplier=Future+Electronics; ComponentLink2URL: https://datasheet.ciiva.com/1391/35241-1391061.pdf?src-supplier=Element14; ComponentLink2Description: https://datasheet.ciiva.com/1391/35241-1391061.pdf?src-supplier=Element14; ComponentLink3URL: https://datasheet.ciiva.com/12342/nh5077-lf-29240-12342970.pdf?src-supplier=Mouser; ComponentLink3Description: https://datasheet.ciiva.com/12342/nh5077-lf-29240-12342970.pdf?src-supplier=Mouser
footprint NH5077-LF
pins: 1 ++, 2 --

## PB-621SR13-TF
designator J?
SMD Button And Strip Battery Connector ROHS; Manufacturer: JST; Manufacturer Part Number: PB-621SR13-TF; Package: SMD; LCSC Part Number: C7472262; Item Type: Battery Connector; ComponentLink1Description: LCSC; ComponentLink1URL: https://www.lcsc.com/product-detail/Button-And-Strip-Battery-Connector_JST-PB-621SR13-TF_C7472262.html
footprint PB-621SR13-TF
pins: 1 ++, 2 --

## PJ-332D-6A
designator J?
3.5mm headphone jack 1A SMD Audio Connectors ROHS; Manufacturer: Korean Hroparts Elec; Manufacturer Part Number: PJ-332D-6A; Package: SMD; LCSC Part Number: C840336; Item Type: Audio Connector; ComponentLink1Description: LCSC; ComponentLink1URL: https://www.lcsc.com/product-detail/Audio-Connectors_Korean-Hroparts-Elec-PJ-332D-6A_C840336.html
footprint PJ-332D-6A
pins: 1, 2, 3, 4, 5, 6

## PJ-342B-TX-SMT
designator J?
-20℃~+70℃ 3.5mm headphone jack 235℃ 12V 0.5A SMD Audio Connectors ROHS; Manufacturer: XKB Connectivity; Manufacturer Part Number: PJ-342B-TX-SMT; Footprint: Custom; ComponentLink1Description: LCSC; ComponentLink1URL: https://www.lcsc.com/product-detail/Audio-Connectors_XKB-Connectivity-PJ-342B-TX-SMT_C388632.html; LCSC Part Number: C388632
footprint PJ-342B-TX-SMT_
pins: 2, 3, 4, 5, 6, 7

## POGO Connector 4 Pin
designator J?
Pogo Pad 2.5mm 4 Pin; Manufacturer Part Number: POGO Connector 4 Pin; Item Type: Pogo Connector
footprint Pogo 4 Pin
pins: 1, 2, 3, 4

## POGO Connector 6 Pin
designator J?
Pogo Pad 2.5mm 6 Pin
footprint POGO 6 Pin
pins: 1, 2, 3, 4, 5, 6

## PRT-10474
designator P?
XT60 CONNECTORS MALE/FEMALE PAIR; Manufacturer: SparkFun; Manufacturer Part Number: PRT-10474; Supplier 1: Digi-Key; RoHS: No; Stock 1: 3234; Pricing 1: 1=1.50000 (USD); ComponentLink1URL: https://cdn.sparkfun.com/datasheets/Prototyping/xt60.pdf?src-supplier=Digi-Key; ComponentLink1Description: https://cdn.sparkfun.com/datasheets/Prototyping/xt60.pdf?src-supplier=Digi-Key; Supplier Part Number 1: 1568-1816-ND
footprint PRT-10474
pins: 1 -, 2 +

## R-RJ45R08P-C000
designator J?
RJ45 RJReceptacle 1 有屏蔽 Right-Angle WithLED 0℃~+70℃ Plugin Ethernet Connectors/Modular Connectors (RJ45 RJ11) ROHS; Manufacturer: Ckmtw; Manufacturer Part Number: R-RJ45R08P-C000; Package: Plugin; LCSC Part Number: C386757; Item Type: Connectors (RJ45 RJ11); ComponentLink1Description: LCSC; ComponentLink1URL: https://www.lcsc.com/product-detail/Ethernet-Connectors-Modular-Connectors-span-style-background-color-ff0-RJ45-span-RJ11_Ckmtw-Shenzhen-Cankemeng-R-RJ45R08P-C000_C386757.html
footprint R-RJ45R08P-C000
pins: 1, 2, 3, 4, 5, 6, 7, 8, 9 L+, 10 L-, 11 R+, 12 R-, 13 S, 14 S

## RC01812
designator J?
RJ45 RJReceptacle 1 Yes Sink board WithLED -40℃~+70℃ SMD Ethernet Connectors/Modular Connectors (RJ45 RJ11) ROHS; Manufacturer: RCH; Manufacturer Part Number: RC01812; Package: SMD; LCSC Part Number: C708645; Item Type: Ethernet Connector; ComponentLink1Description: LCSC; ComponentLink1URL: https://www.lcsc.com/product-detail/Ethernet-Connectors-Modular-Connectors-RJ45-RJ11_RCH-RC01812_C708645.html
footprint RC01812
pins: 1, 2, 3, 4, 5, 6, 7, 8, 9 G-, 10 G+, 11 Y-, 12 Y+, Shield 1, Shield 2

## RC01835
designator J?
RJ45 RJReceptacle 1 有屏蔽 Sink board WithLED -40℃~+70℃ Plugin Ethernet Connectors/Modular Connectors (RJ45 RJ11) ROHS; Manufacturer: RCH; Manufacturer Part Number: RC01835; Package: Plugin; LCSC Part Number: C708648; Item Type: Ethernet; ComponentLink1Description: LCSC; ComponentLink1URL: https://www.lcsc.com/product-detail/Ethernet-Connectors-Modular-Connectors-RJ45-RJ11_RCH-RC01835_C708648.html
footprint RC01835
pins: 1, 2, 3, 4, 5, 6, 7, 8, 9 Y-, 10 Y+, 11 G-, 12 G+, 13 Shell, 14 Shell

## RD-CR1220-2
designator J?
CR1220 2 cell connector; Manufacturer: Reida; Manufacturer Part Number: RD-CR1220-2
footprint RD-CR1220-2
pins: 1 ++, 2 ++, 3 --

## RJE73-188-00441
designator J?
CONN MOD JACK 8P8C R/A SHIELDED; Manufacturer: Amphenol Commercial; Manufacturer Part Number: RJE73-188-00441; Gender: Female; Current Rating: 1A; Voltage Rating: 125V; Connector Type: Jack,RJ45; Number of Ports: 1; Direction: Down; Insulation Resistance: 500MR; Number of Contacts: 8; Item Type: Ethernet Connector; Supplier 1: Digi-Key; RoHS: Yes; Category: Connectors; Stock 1: 1188; Pricing 1: 1=3.16, 10=2.867, 25=2.7152, 50=2.652 (USD); Mounting Technology: Through Hole; Contact Plating: Gold; Contact Material: Bronze; Color: Black,Green,Yellow; Housing Material: Thermoplastic; Min Operating Temperature: -55°C; Max Operating Temperature: 85°C; Package Quantity: 1; Number of Rows: 1; Shielding: Shielded; Packaging: Tape and Reel; Termination: Through Hole; Number of Positions: 8; Series: RJE73; Flammability Rating: UL94 V-0; RoHS Compliant: Yes; Reach SVHC Compliant: Unknown; ComponentLink1URL: https://datasheet.ciiva.com/15372/rje7318800xxx-247724-15372477.pdf?src-supplier=Mouser; ComponentLink1Description: https://datasheet.ciiva.com/15372/rje7318800xxx-247724-15372477.pdf?src-supplier=Mouser; ComponentLink2URL: https://datasheet.ciiva.com/22726/1914870-22726118.pdf?src-supplier=Element14; ComponentLink2Description: https://datasheet.ciiva.com/22726/1914870-22726118.pdf?src-supplier=Element14; ComponentLink3URL: https://datasheet.ciiva.com/18452/70252835-18452663.pdf?src-supplier=Allied+Electronics; ComponentLink3Description: https://datasheet.ciiva.com/18452/70252835-18452663.pdf?src-supplier=Allied+Electronics; ComponentLink4URL: https://datasheet.ciiva.com/6948/p-rje73-188-00xxxdrawing-6948757.pdf?src-supplier=Digi-Key; ComponentLink4Description: https://datasheet.ciiva.com/6948/p-rje73-188-00xxxdrawing-6948757.pdf?src-supplier=Digi-Key; Supplier Part Number 1: RJE73-188-00441CT-ND
footprint RJE73-188-00441
pins: 1 TX+, 2 TX-, 3 RX+, 4 DC + POE, 5 DC + POE, 6 RX-, 7 DC - POE, 8 DC - POE, 9 A+, 10 C -, 11 A+, 12 C -, 13 SH1, 14 SH2

## SFW5R-1STE1LF
designator J?
CONN FFC FPC BOTTOM 5POS 1MM R/A; Manufacturer: Amphenol ICC / FCI; Manufacturer Part Number: SFW5R-1STE1LF; Item Type: FFC / FPC; Supplier: Avnet; Supplier Part Number: 62K5638; RoHS: Yes; Stock: 33; Pricing: 1=0.257 (USD); ComponentLink1URL: https://datasheet.ciiva.com/5137/sfw12lf-5137830.pdf?src-supplier=Mouser; ComponentLink1Description: https://datasheet.ciiva.com/5137/sfw12lf-5137830.pdf?src-supplier=Mouser; ComponentLink2URL: https://datasheet.ciiva.com/8038/sfw12lf-8038169.pdf?src-supplier=Element14; ComponentLink2Description: https://datasheet.ciiva.com/8038/sfw12lf-8038169.pdf?src-supplier=Element14; ComponentLink3URL: https://datasheet.ciiva.com/10369/sfw12lf-10369098.pdf?src-supplier=Avnet; ComponentLink3Description: https://datasheet.ciiva.com/10369/sfw12lf-10369098.pdf?src-supplier=Avnet; ComponentLink4URL: https://datasheet.ciiva.com/670/sfw12lf-670021.pdf?src-supplier=Digikey; ComponentLink4Description: https://datasheet.ciiva.com/670/sfw12lf-670021.pdf?src-supplier=Digikey; ComponentLink5URL: https://datasheet.ciiva.com/670/sfw12lf-670022.pdf?src-supplier=Digikey; ComponentLink5Description: https://datasheet.ciiva.com/670/sfw12lf-670022.pdf?src-supplier=Digikey; ComponentLink6URL: https://datasheet.ciiva.com/670/sfw12lf-670023.pdf?src-supplier=Digikey; ComponentLink6Description: https://datasheet.ciiva.com/670/sfw12lf-670023.pdf?src-supplier=Digikey
footprint SFW5R-1STE1LF
pins: 1, 2, 3, 4, 5, MP1, MP2

## SIB-103-02-F-S-LC
designator J?
CONN SPRING MOD 3POS SMD; Manufacturer: Samtec; Manufacturer Part Number: SIB-103-02-F-S-LC; Item Type: Connectors; Number of Contacts: 3; Connector Type: Non-Gendered; Pitch: 2.54mm; Supplier: Mouser; Supplier Part Number: 200-SIB10302FSLC; RoHS: Yes; Stock: 145; Pricing: 1=3.25, 10=3.25, 50=2.65, 100=2.65, 1000=2, 10000=0.95 (USD); Contact Plating: Gold; Contact Material: Bronze; Material: Bronze; Packaging: Rail/Tube; Number of Rows: 1; Termination: SMD/SMT; Series: SIB; Radiation Hardening: No; Reach SVHC Compliant: No; RoHS Compliant: Yes; ComponentLink1URL: http://www.farnell.com/datasheets/2045641.pdf?src-supplier=Farnell; ComponentLink1Description: http://www.farnell.com/datasheets/2045641.pdf?src-supplier=Farnell; ComponentLink2URL: http://www.samtec.com/ftppub/pdf/sib_sm.pdf?src-supplier=Avnet; ComponentLink2Description: http://www.samtec.com/ftppub/pdf/sib_sm.pdf?src-supplier=Avnet; ComponentLink3URL: https://datasheet.octopart.com/SIB-103-02-F-S-LC-Samtec-datasheet-62107142.pdf?src-supplier=Farnell; ComponentLink3Description: https://datasheet.octopart.com/SIB-103-02-F-S-LC-Samtec-datasheet-62107142.pdf?src-supplier=Farnell; ComponentLink4URL: https://datasheet.octopart.com/SIB-103-02-F-S-LC-Samtec-datasheet-21214619.pdf?src-supplier=Newark; ComponentLink4Description: https://datasheet.octopart.com/SIB-103-02-F-S-LC-Samtec-datasheet-21214619.pdf?src-supplier=Newark; ComponentLink5URL: https://datasheet.octopart.com/SIB-103-02-F-S-LC-Samtec-datasheet-97278993.pdf?src-supplier=Samtec; ComponentLink5Description: https://datasheet.octopart.com/SIB-103-02-F-S-LC-Samtec-datasheet-97278993.pdf?src-supplier=Samtec; ComponentLink6URL: https://datasheet.octopart.com/SIB-103-02-F-S-LC-Samtec-datasheet-151555637.pdf?src-supplier=Sager+Electronics; ComponentLink6Description: https://datasheet.octopart.com/SIB-103-02-F-S-LC-Samtec-datasheet-151555637.pdf?src-supplier=Sager+Electronics
footprint SIB-103-02-F-S-LC
pins: 1, 2, 3

## SIR1-03-S-S-K
designator J?
.100" RIGHT-ANGLE ONE-PIECE INTE; Manufacturer: Samtec; Manufacturer Part Number: SIR1-03-S-S-K; Item Type: Spring Compression Contact; Supplier: Digikey; Supplier Part Number: 612-SIR1-03-S-S-K-ND; RoHS: Yes; Category: Connectors; Pricing: 55=5.28127 (USD); Contact Material: Bronze; Contact Plating: Gold; RoHS Compliant: Yes
footprint SIR1-03-S-S-K
pins: 1, 2, 3, MH1, MH2, MH3, MH4

## SMA-J-P-H-ST-TH1
designator J?
CONN SMA JACK STR 50 OHM PCB; Manufacturer: Samtec; Manufacturer Part Number: SMA-J-P-H-ST-TH1; Item Type: RF / Coaxial Connectors; Frequency: 20GHz; Number of Contacts: 1NUMBER; Supplier: Arrow Electronics; Supplier Part Number: SMA-J-P-H-ST-TH1; RoHS: Yes; Stock: 32413; Pricing: 1=5.81, 25=5.03, 50=4.25 (USD); ComponentLink1URL: https://datasheet.ciiva.com/646/sma-j-p-x-st-th1-mkt-646059.pdf?src-supplier=Digikey; ComponentLink1Description: https://datasheet.ciiva.com/646/sma-j-p-x-st-th1-mkt-646059.pdf?src-supplier=Digikey
footprint SMA-J-P-H-ST-TH1
pins: 1, 2, 3 2, 4 2, 5 2

## SMC-1-05-1-GT
designator J?
MACHINE PIN SOCKET 5P 2.54MM PIT; Manufacturer: Adam Equipment; Manufacturer Part Number: SMC-1-05-1-GT; Item Type: Pin Header; Supplier 1: Digi-Key; RoHS: No; Stock 1: 1697; Pricing 1: 1=0.41000, 10=0.38500, 25=0.33040, 50=0.28080, 100=0.26970, 250=0.24224, 500=0.23120, 1000=0.19268, 2500=0.17616 (USD); Supplier Part Number 1: 2057-SMC-1-05-1-GT-ND; LCSC Part Number: C3320109
footprint SMC-1-05-1-GT
pins: 1, 2, 3, 4, 5

## SMD PADS (1x4) 2.54mm pitch
designator P?
footprint SMD PADS (1x4) 2.54mm pitch_
pins: 1, 2, 3, 4

## SMD PADS (1x8) 2.54mm
designator J?
footprint SMD PADS (1x8) 2.54mm
pins: 1, 2, 3, 4, 5, 6, 7, 8

## SMD PADS (1x10) 2.54mm
designator P?
footprint SMD PADS (1x10) 2.54mm
pins: 1, 2, 3, 4, 5, 6, 7, 8, 9, 10

## SS-7188S-A-NF
designator J?
CONN MOD JACK 8P8C R/A SHIELDED; Manufacturer: Bel; Manufacturer Part Number: SS-7188S-A-NF; Item Type: Connectors; Supplier: Digikey; Supplier Part Number: 380-1047-ND; RoHS: Yes; Stock: 8195; Pricing: 1=2.36, 10=2.058, 33=1.9703, 66=1.92652, 132=1.83894, 264=1.66379, 528=1.53242, 1023=1.31351, 2508=1.22594 (USD); Lead Free: 5698LeadFree; ComponentLink1URL: https://datasheet.ciiva.com/11726/0900766b8001c3e8-11726092.pdf?src-supplier=Rs; ComponentLink1Description: https://datasheet.ciiva.com/11726/0900766b8001c3e8-11726092.pdf?src-supplier=Rs; ComponentLink2URL: https://datasheet.ciiva.com/685/ct710001-685643.pdf?src-supplier=Digikey; ComponentLink2Description: https://datasheet.ciiva.com/685/ct710001-685643.pdf?src-supplier=Digikey; ComponentLink3URL: https://datasheet.ciiva.com/26934/getdatasheetpartid-781435-26934401.pdf?src-supplier=Verical; ComponentLink3Description: https://datasheet.ciiva.com/26934/getdatasheetpartid-781435-26934401.pdf?src-supplier=Verical; ComponentLink4URL: https://datasheet.ciiva.com/3138/ct710001-3138744.pdf?src-supplier=Avnet; ComponentLink4Description: https://datasheet.ciiva.com/3138/ct710001-3138744.pdf?src-supplier=Avnet; ComponentLink5URL: https://datasheet.ciiva.com/15170/getdatasheetpartid-79418-15170477.pdf?src-supplier=Verical; ComponentLink5Description: https://datasheet.ciiva.com/15170/getdatasheetpartid-79418-15170477.pdf?src-supplier=Verical
footprint SS-7188S-A-NF
pins: 1 RD+, 2 RD-, 3 RCT, 4 NC, 5 NC, 6 TCT, 7 TD+, 8 TD-, S1 Shield, S2 Shield

## SSW-101-01-T-S
designator J?
CONN RCPT 1POS TIN PCB; Manufacturer: Samtec; Manufacturer Part Number: SSW-101-01-T-S; Item Type: Connectors; Supplier: Digikey; Supplier Part Number: SAM1213-01-ND; RoHS: Yes; Stock: 1888; Pricing: 1=0.19, 10=0.16, 100=0.1234, 500=0.10438, 1000=0.08541, 5000=0.07592, 10000=0.0688 (USD); ComponentLink1URL: https://datasheet.ciiva.com/750/ssw-1xx-xx-xxx-x-xx-xxx-xx-mkt-750077.pdf?src-supplier=Digikey; ComponentLink1Description: https://datasheet.ciiva.com/750/ssw-1xx-xx-xxx-x-xx-xxx-xx-mkt-750077.pdf?src-supplier=Digikey
footprint HDR 1x1
pins: 1

## T4144035051-000
designator J?
M12 RA M PNL REAR A 5P PCB SHLD; Manufacturer: TE Connectivity AMP Connectors; Manufacturer Part Number: T4144035051-000; Item Type: Connector; Package: Custom
footprint T4144035051-000
pins: 1, 2, 3, 4, 5, SH Sheild

## TC2030-IDC
designator J?
CABLE ADAPTER 6 POS; Manufacturer: Tag-Connect; Manufacturer Part Number: TC2030-IDC; ComponentLink1URL: http://www.tag-connect.com/Materials/TC2030-MCP%20Datasheet.pdf?src-supplier=Digi-Key; ComponentLink1Description: http://www.tag-connect.com/Materials/TC2030-MCP%20Datasheet.pdf?src-supplier=Digi-Key; Supplier 1: Digi-Key; Stock 1: 284; Pricing 1: 1=43.71 (USD); Package Quantity: 1; Supplier Part Number 1: TC2030-IDC-ND
footprint TC2030-IDC_ (CABLE ADAPTER 6 POS)
pins: 1, 2, 3, 4, 5, 6, MP1, MP2, MP3, MP4, MP5, MP6, MP7

## TC2030-IDC-NL
designator J?
footprint TC2030-IDC-NL_
pins: 1, 2, 3, 4, 5, 6, MP1, MP2, MP3

## TC2030-MCP-NL
designator J?  (no BOM)
PLUG-OF-NAILS 6-PIN W/O LEGS; Manufacturer: Tag-Connect; Manufacturer Part Number: TC2030-MCP-NL; Description: Cable Tag-connect In-circuit; Item Type: Cables and Wire; Number of Contacts: 6; Shielding: No; Supplier: DigiKey; Supplier Part Number: TC2030-MCP-NLTC-ND; RoHS: Compliant; Stock: 740; Pricing: 1=36 (USD); Lead Free: Lead Free; REACH SVHC: No; ComponentLink1URL: https://datasheet.octopart.com:443/TC2030-MCP-NL-Tag-Connect-datasheet-181254555.pdf?src-supplier=IHS; ComponentLink1Description: https://datasheet.octopart.com:443/TC2030-MCP-NL-Tag-Connect-datasheet-181254555.pdf?src-supplier=IHS; ComponentLink2URL: https://datasheet.octopart.com:443/TC2030-MCP-NL-Tag-Connect-datasheet-17049191.pdf?src-supplier=Factory+Futures; ComponentLink2Description: https://datasheet.octopart.com:443/TC2030-MCP-NL-Tag-Connect-datasheet-17049191.pdf?src-supplier=Factory+Futures
footprint TC2030-MCP-NL
pins: 1, 2, 3, 4, 5, 6
text: Needle; Prog.

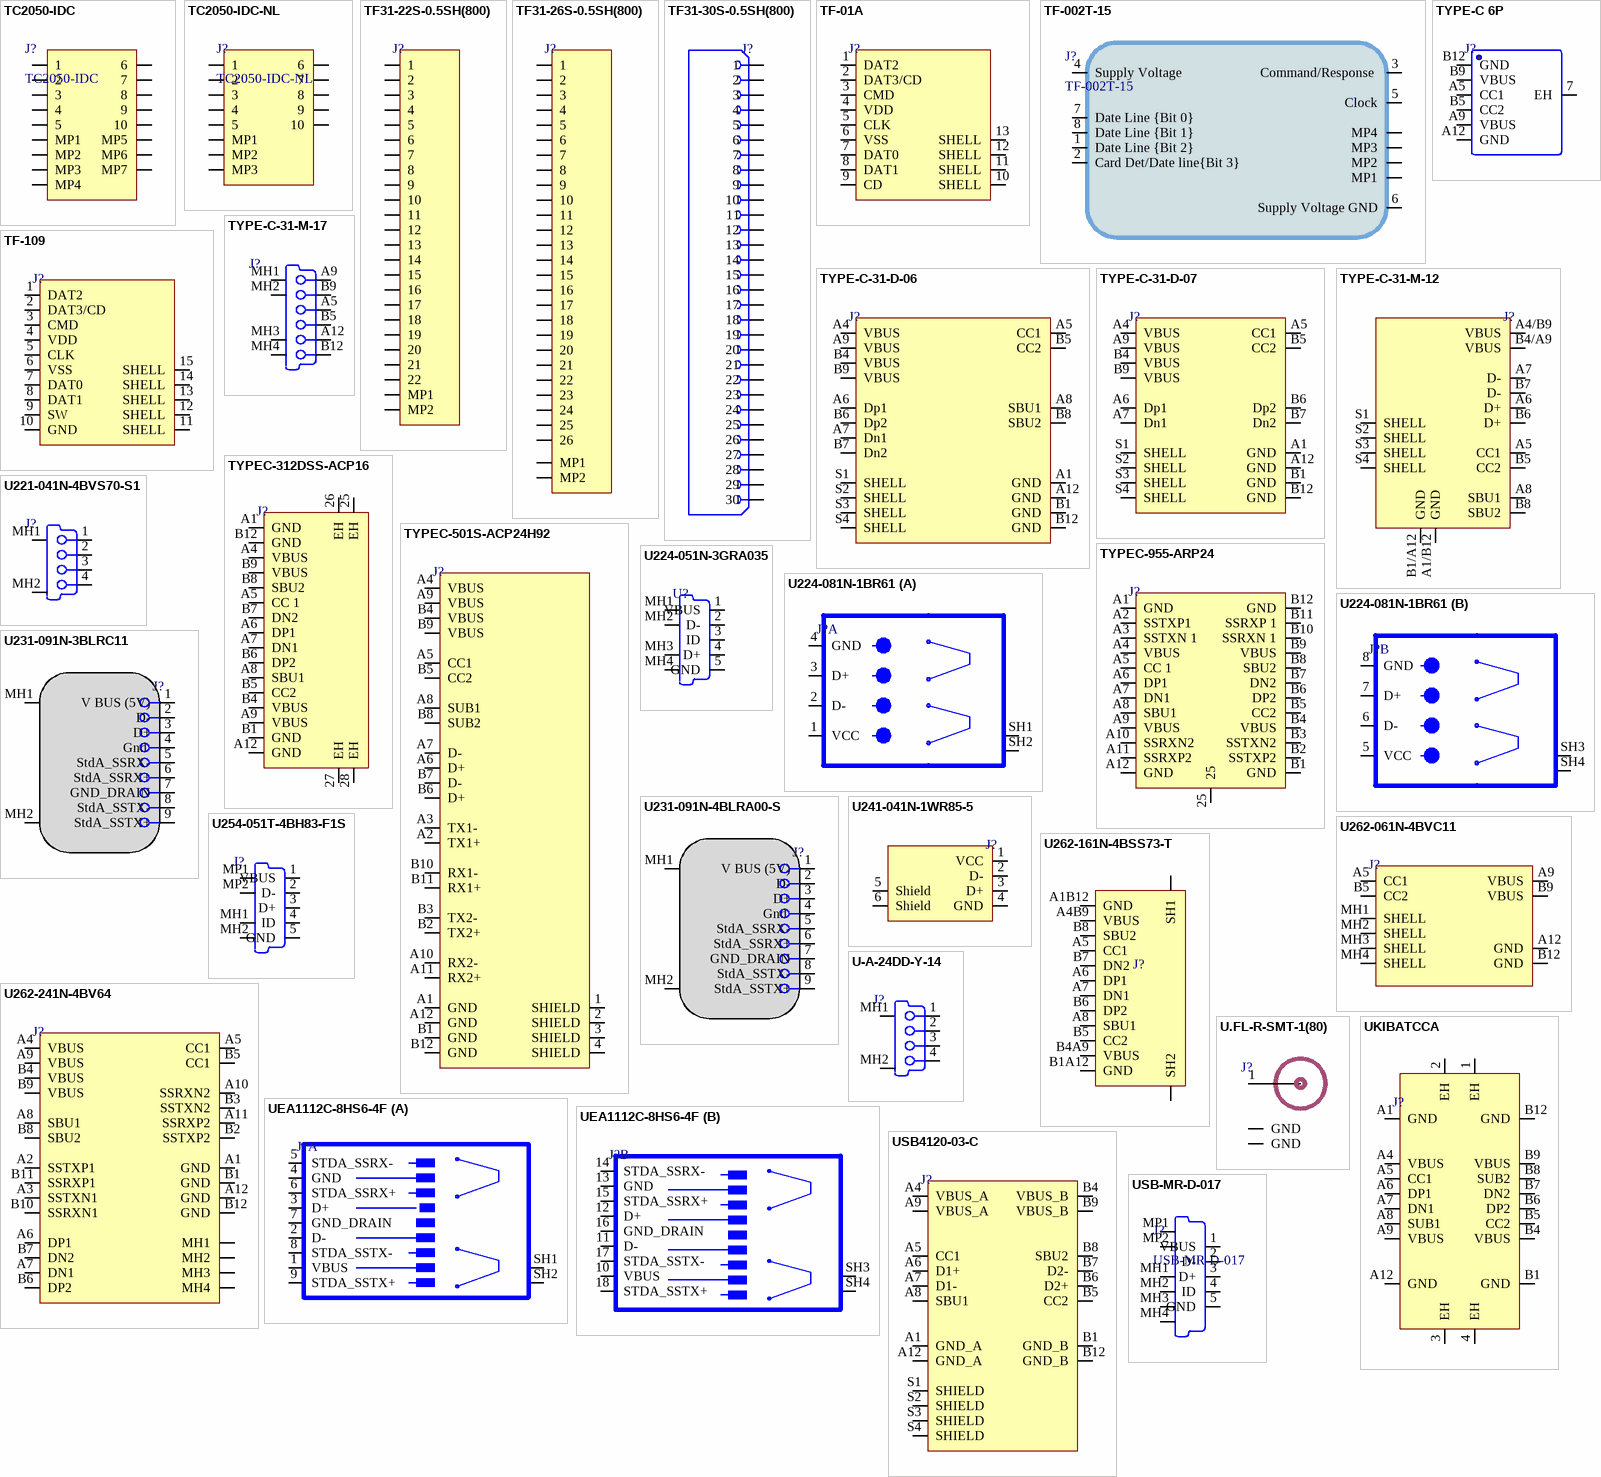
[diagram p7: symbols TC2050-IDC to USB-MR-D-017]

## TC2050-IDC
designator J?
CBL PLUG-OF-NAILS 10-PIN W/LEGS; Manufacturer: Tag-Connect; Supplier 1: Digi-Key; Manufacturer Part Number: TC2050-IDC; Stock 1: 59; Pricing 1: 1=40.17 (USD); Package Quantity: 1; ComponentLink1URL: http://www.tag-connect.com/Materials/TC2050-IDC%20Datasheet.pdf?src-supplier=Digi-Key; ComponentLink1Description: http://www.tag-connect.com/Materials/TC2050-IDC%20Datasheet.pdf?src-supplier=Digi-Key; Supplier Part Number 1: TC2050-IDC-ND
footprint TC2050-IDC_ (CBL PLUG-OF-NAILS 10-PIN W/LEGS)
pins: 1, 2, 3, 4, 5, 6, 7, 8, 9, 10, MP1, MP2, MP3, MP4, MP5, MP6, MP7

## TC2050-IDC-NL
designator J?
CBL PLUG-OF-NAILS 10-PIN; Manufacturer: Tag-Connect; Supplier 1: Digi-Key; Manufacturer Part Number: TC2050-IDC-NL; Stock 1: 544; Pricing 1: 1=40.17 (USD); Package Quantity: 1; ComponentLink1URL: http://www.tag-connect.com/Materials/TC2050-IDC-NL%20Datasheet.pdf?src-supplier=Digi-Key; ComponentLink1Description: http://www.tag-connect.com/Materials/TC2050-IDC-NL%20Datasheet.pdf?src-supplier=Digi-Key; Supplier Part Number 1: TC2050-IDC-NL-ND
footprint TC2050-IDC-NL_ (CBL PLUG-OF-NAILS 10-PIN)
pins: 1, 2, 3, 4, 5, 6, 7, 8, 9, 10, MP1, MP2, MP3

## TF31-22S-0.5SH(800)
designator J?
CONN FFC 22POS 0.50MM SMD; Manufacturer: Hirose; Manufacturer Part Number: TF31-22S-0.5SH(800); Supplier 1: Digi-Key; RoHS: Yes; Stock 1: 14399; Pricing 1: 1=0.46000, 10=0.43100, 25=0.36920, 50=0.31360, 100=0.30140, 250=0.27060, 500=0.25830, 1000=0.21525 (USD); RoHS Compliant: No; Supplier Part Number 1: 26-TF31-22S-0.5SH(800)CT-ND
footprint TF31-22S-0.5SH(800)_ (CONN FFC 22POS 0.50MM SMD)
pins: 1, 2, 3, 4, 5, 6, 7, 8, 9, 10, 11, 12, 13, 14, 15, 16, 17, 18, 19, 20, 21, 22, MP1, MP2

## TF31-26S-0.5SH(800)
designator J?
FFC FPC Connectors Horizontal Mounting Angle Beige 0.5 mm - Pitch 26 Positions; Manufacturer: Hirose; Manufacturer Part Number: TF31-26S-0.5SH(800); Supplier 1: Digi-Key; RoHS: Yes; Category: FFC / FPC; Stock 1: 17190; Pricing 1: 1=2.08000, 10=1.88700, 25=1.77120, 50=1.69400, 100=1.61700, 250=1.46300, 500=1.34750, 1000=1.15500 (USD); RoHS Compliant: No; Supplier Part Number 1: 26-TF31-26S-0.5SH(800)CT-ND
footprint TF31-26S-0.5SH(800)_ (CONN FFC 26POS 0.50MM SMD)
pins: 1, 2, 3, 4, 5, 6, 7, 8, 9, 10, 11, 12, 13, 14, 15, 16, 17, 18, 19, 20, 21, 22, 23, 24, 25, 26, MP1, MP2

## TF31-30S-0.5SH(800)
designator J?
CONN FFC BOTTOM 30POS 0.5MM R/A; Manufacturer: Hirose; Manufacturer Part Number: TF31-30S-0.5SH(800); Item Type: FFC / FPC Connector; Supplier: Digikey; Supplier Part Number: 26-TF31-30S-0.5SH(800)CT-ND; RoHS: Yes; Stock: 14095; Pricing: 1=2.37, 10=2.065, 25=1.9772, 50=1.9332, 100=1.8453, 250=1.66952, 500=1.53772, 1000=1.31805 (USD); ComponentLink1URL: https://www.hirose.com/product/download/?distributor=digikey&amp;type=specSheet&amp;lang=en&amp;num=TF31-30S-0.5SH(800)&src-supplier=Digikey; ComponentLink1Description: https://www.hirose.com/product/download/?distributor=digikey&amp;type=specSheet&amp;lang=en&amp;num=TF31-30S-0.5SH(800)&src-supplier=Digikey; ComponentLink2URL: https://datasheet.octopart.com/TF31-30S-0.5SH%28800%29-Hirose-datasheet-138123803.pdf?src-supplier=Sager+Electronics; ComponentLink2Description: https://datasheet.octopart.com/TF31-30S-0.5SH%28800%29-Hirose-datasheet-138123803.pdf?src-supplier=Sager+Electronics; LCSC Part Number: C5137133
footprint TF31-30S-0.5SH(800)
pins: 1, 2, 3, 4, 5, 6, 7, 8, 9, 10, 11, 12, 13, 14, 15, 16, 17, 18, 19, 20, 21, 22, 23, 24, 25, 26, 27, 28, 29, 30

## TF-01A
designator J?
2mm Deck MicroSD card (TF card) Self bomb SMD SD Card / Memory Card Connector ROHS; Manufacturer: Yuandi; Manufacturer Part Number: TF-01A; Package: SMD; LCSC Part Number: C2889258; Item Type: MicroSD card; ComponentLink1Description: LCSC; ComponentLink1URL: https://www.lcsc.com/product-detail/SD-Card-Memory-Card-Connector_Yuandi-TF-01A_C2889258.html
footprint TF-01A
pins: 1 DAT2, 2 DAT3/CD, 3 CMD, 4 VDD, 5 CLK, 6 VSS, 7 DAT0, 8 DAT1, 9 CD, 10 SHELL, 11 SHELL, 12 SHELL, 13 SHELL

## TF-002T-15
designator J?
SD Card Connector SMD; Manufacturer: SOFNG; Card Type: MicroSD; Card Connection Mode: Pluggable; ComponentLink1Description: LCSC; ComponentLink1URL: https://lcsc.com/product-detail/SD-Card-Connectors_SOFNG-TF-002T-15_C125616.html
footprint TF-002T-15 (SMD SD Card Connectors ROHS)
pins: 1 Date Line {Bit 2}, 2 Card Det/Date line{Bit 3}, 3 Command/Response , 4 Supply Voltage (power), 5 Clock, 6 Supply Voltage GND (power), 7 Date Line {Bit 0}, 8 Date Line {Bit 1}, MP1, MP2, MP3, MP4

## TF-109
designator J?
-45℃~+85℃ 1.4mm Gold Deck MicroSD card (TF card) 260℃ Phosphor coppe Self bomb SMD SD Card Connectors ROHS; Manufacturer: XUNPU; Manufacturer Part Number: TF-109; Package: SMD; LCSC Part Number: C266617; Item Type: SD Card Connector; ComponentLink1Description: LCSC; ComponentLink1URL: https://www.lcsc.com/product-detail/SD-Card-Connectors_XUNPU-TF-109_C266617.html
footprint TF-109
pins: 1 DAT2, 2 DAT3/CD, 3 CMD, 4 VDD, 5 CLK, 6 VSS, 7 DAT0, 8 DAT1, 9 SW, 10 GND, 11 SHELL, 12 SHELL, 13 SHELL, 14 SHELL, 15 SHELL

## TYPE-C 6P
designator J?
1 Surface Mount，Right Angle 6P Female -40℃~+85℃ Type-C SMD USB Connectors ROHS; Manufacturer: SHOU HAN; Manufacturer Part Number: TYPE-C 6P; Package: SMD; LCSC Part Number: C456012; Item Type: Type-C SMD; ComponentLink1Description: LCSC; ComponentLink1URL: https://www.lcsc.com/product-detail/USB-Connectors_SHOU-HAN-TYPE-C-6P_C456012.html
footprint TYPE-C 6P
pins: 7 EH, A5 CC1, A9 VBUS, A12 GND, B5 CC2, B9 VBUS, B12 GND

## TYPE-C-31-D-06
designator J?
1 Brick nogging 16 Female -25℃~+85℃ Type-C SMD USB Connectors ROHS; Manufacturer Part Number: TYPE-C-31-D-06; Manufacturer: Korean Hroparts Elec; Package: Custom; LCSC Part Number: C2689964; Item Type: USB Connector; ComponentLink1Description: LCSC; ComponentLink1URL: https://www.lcsc.com/product-detail/USB-Connectors_Korean-Hroparts-Elec-TYPE-C-31-D-06_C2689964.html
footprint TYPE-C-31-D-06
pins: A1 GND (power), A4 VBUS (power), A5 CC1, A6 Dp1, A7 Dn1, A8 SBU1, A9 VBUS (power), A12 GND (power), B1 GND (power), B4 VBUS (power), B5 CC2, B6 Dp2, B7 Dn2, B8 SBU2, B9 VBUS (power), B12 GND (power), S1 SHELL, S2 SHELL, S3 SHELL, S4 SHELL

## TYPE-C-31-D-07
designator J?
1 Brick nogging 14P Female Type-C SMD USB Connectors ROHS; Manufacturer: Korean Hroparts Elec; Manufacturer Part Number: TYPE-C-31-D-07; Package: SMD; Item Type: USB Connector; ComponentLink1Description: LCSC; ComponentLink1URL: https://www.lcsc.com/product-detail/USB-Connectors_Korean-Hroparts-Elec-TYPE-C-31-D-07_C2689965.html; LCSC Part Number: C2689965
footprint TYPE-C-31-D-07
pins: A1 GND (power), A4 VBUS (power), A5 CC1, A6 Dp1, A7 Dn1, A9 VBUS (power), A12 GND (power), B1 GND (power), B4 VBUS (power), B5 CC2, B6 Dp2, B7 Dn2, B9 VBUS (power), B12 GND (power), S1 SHELL, S2 SHELL, S3 SHELL, S4 SHELL

## TYPE-C-31-M-12
designator J?
5A 1 16P Female Type-C SMD USB Connectors ROHS; Manufacturer: Korean Hroparts Elec; Manufacturer Part Number: TYPE-C-31-M-12; ComponentLink1Description: LCSC; ComponentLink1URL: https://www.lcsc.com/product-detail/USB-Connectors_Korean-Hroparts-Elec-TYPE-C-31-M-12_C165948.html; Footprint: Custom; LCSC Part Number: C165948; Item Type: USB Connector
footprint TYPE-C-31-M-12_
pins: A1/B12 GND (power), A4/B9 VBUS (power), A5 CC1, A6 D+, A7 D-, A8 SBU1, B1/A12 GND (power), B4/A9 VBUS (power), B5 CC2, B6 D+, B7 D-, B8 SBU2, S1 SHELL, S2 SHELL, S3 SHELL, S4 SHELL

## TYPE-C-31-M-17
designator J?
Receptacle USB - Type C 6 - USB Connectors ROHS; Manufacturer: Koren Hroparts Elec; Manufacturer Part Number: Type-C-31-M-17; Footprint: Custom; ComponentLink1Description: LCSC; ComponentLink1URL: https://www.lcsc.com/product-detail/USB-Connectors_Korean-Hroparts-Elec-TYPE-C-31-M-17_C283540.html; LCSC Part Number: C283540; Item Type: Connector
footprint TYPE-C-31-M-17_
pins: A5 CC1 "USB Data + [Green]", A9 VBUS  "USB Vcc [Red]", A12 GND "Ground [Black]", B5 CC2 "Not Connected (or joined to pin 5 via resistor)", B9 VBUS "USB Data - [White]", B12 GND "Ground [Black]", MH1 Tab "Shell", MH2 Tab "Shell", MH3 Tab "Shell", MH4 Tab "Shell"